# Altium footprint library Propia.PcbLib: 378 footprints (part 23 of 24)
Each footprint in its own frame and in the unit in brackets; x right, y up, seen from the top. Pads: shape width x height; smd on the part's side, far side on the other; paste and mask are expansions set on the pad; w line width, h text height; cw(c..) or ccw(c..) is an arc to the next point about the centre after c.
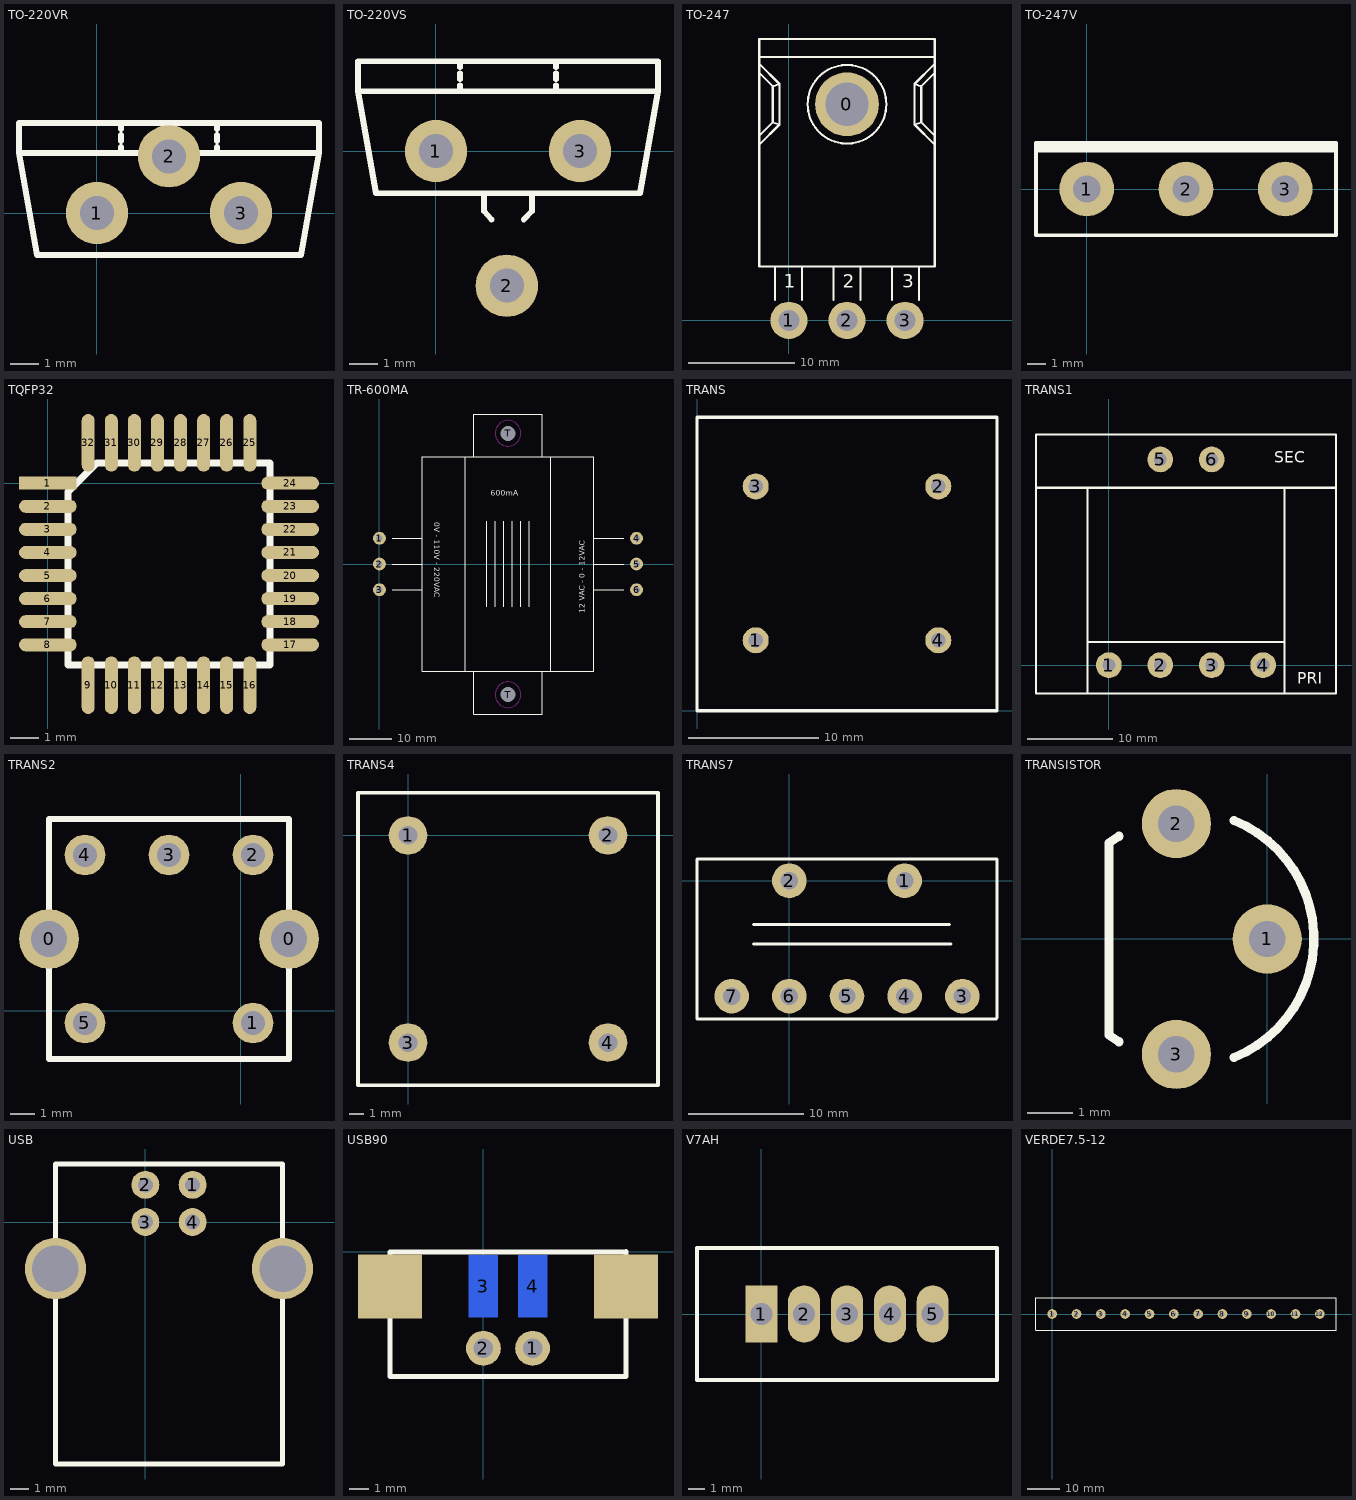
[diagram p22: the footprints below, top view; thin cyan lines are the x and y axes]

## TO-220VR [mm]
pads (3):
  round 2.2 hole 1.2: 1(0,0) 2(2.54,2) 3(5.08,0)
TopOverlay:
  lines w0.2: 0.847,2.117 0.847,2.328 ; 0.847,2.54 0.847,2.752 ; 0.847,2.963 0.847,3.175 ; 4.233,2.117 4.233,2.328 ; 4.233,2.54 4.233,2.752 ; 4.233,2.963 4.233,3.175 ; -2.752,2.117 7.832,2.117 ; -2.752,2.117 -2.117,-1.482 7.197,-1.482 7.832,2.117 ; -2.752,2.117 -2.752,3.175 7.832,3.175 7.832,2.117

## TO-220VS [mm]
pads (3):
  round 2.2 hole 1.2: 1(0,0) 2(2.5,-4.75) 3(5.08,0)
TopOverlay:
  lines w0.2: 0.847,2.117 0.847,2.328 ; 0.847,2.54 0.847,2.752 ; 0.847,2.963 0.847,3.175 ; 1.693,-1.482 1.693,-2.117 1.957,-2.416 ; 3.099,-2.416 3.387,-2.117 3.387,-1.482 ; 4.233,2.117 4.233,2.328 ; 4.233,2.54 4.233,2.752 ; 4.233,2.963 4.233,3.175 ; -2.752,2.117 -2.752,3.175 7.832,3.175 7.832,2.117 ; -2.752,2.117 -2.117,-1.482 7.197,-1.482 7.832,2.117 ; -2.752,2.117 7.832,2.117

## TO-247 [mm]
pads (4):
  round 6 hole 4.064: 0(5.461,20.32)
  round 3.5 hole 2: 1(0,0) 2(5.461,0) 3(10.922,0)
TopOverlay:
  circle w0.2: c5.461,20.32 r3.698
  lines w0.2: -2.794,16.51 -0.889,18.415 ; -2.794,17.357 -1.524,18.627 ; -2.794,23.283 -1.524,22.013 ; -2.794,24.13 -0.889,22.225 ; -2.794,24.765 13.716,24.765 ; -1.312,1.905 -1.312,5.08 ; 1.228,1.905 1.228,5.08 ; 4.191,1.905 4.191,5.08 ; 6.731,1.905 6.731,5.08 ; 9.694,1.905 9.694,5.08 ; 12.234,1.905 12.234,5.08 ; 13.716,16.51 11.811,18.415 ; 13.716,17.357 12.446,18.627 ; 13.716,23.283 12.446,22.013 ; 13.716,24.13 11.811,22.225 ; -1.524,18.627 -0.889,18.415 ; -1.524,18.627 -1.524,22.013 ; -1.524,22.013 -0.889,22.225 ; -0.889,18.415 -0.889,22.225 ; 11.811,18.415 12.446,18.627 ; 11.811,18.415 11.811,22.225 ; 11.811,22.225 12.446,22.013 ; 12.446,18.627 12.446,22.013 ; -2.794,5.08 -2.794,26.458 13.716,26.458 13.716,5.08 -2.794,5.08
  text "3" at 10.668,3.048 h1.27
  text "2" at 5.08,3.048 h1.27
  text "1" at -0.508,3.048 h1.27

## TO-247V [mm]
pads (3):
  round 3 hole 1.5: 1(0,0) 2(5.461,0) 3(10.922,0)
TopOverlay:
  lines w0.2: -2.794,2.117 13.716,2.117 ; -2.794,2.201 13.716,2.201 ; -2.794,2.328 13.716,2.328 ; -2.794,2.413 13.716,2.413 ; -2.794,-2.54 -2.794,2.54 13.716,2.54 13.716,-2.54 -2.794,-2.54

## TQFP32 [mm]
pads (32):
  rect 2x0.45 smd: 1(0,0)
  oval 2x0.45 smd: 2(0,-0.8) 3(0,-1.6) 4(0,-2.4) 5(0,-3.2) 6(0,-4) 7(0,-4.8) 8(0,-5.6) 17(8.4,-5.6) 18(8.4,-4.8) 19(8.4,-4) 20(8.4,-3.2) 21(8.4,-2.4) 22(8.4,-1.6) 23(8.4,-0.8) 24(8.4,0)
  oval 0.45x2 smd: 9(1.4,-7) 10(2.2,-7) 11(3,-7) 12(3.8,-7) 13(4.6,-7) 14(5.4,-7) 15(6.2,-7) 16(7,-7) 25(7,1.4) 26(6.2,1.4) 27(5.4,1.4) 28(4.6,1.4) 29(3.8,1.4) 30(3,1.4) 31(2.2,1.4) 32(1.4,1.4)
TopOverlay:
  lines w0.254: 0.7,-0.3 0.7,-6.3 7.7,-6.3 7.7,0.7 1.7,0.7 0.7,-0.3 ; 0.7,-0.3 0.7,-0.3

## TR-600MA [mm]
pads (8):
  round 3 hole 1.5: 1(0,6) 2(0,0) 3(0,-6) 4(60,6) 5(60,0) 6(60,-6)
  round 3 hole 3.5: T(30,-30.5) T(30,30.5)
TopOverlay:
  lines w0.254: 3,-6 9.9,-6 ; 3,0 10,0 ; 3,6 10,6 ; 20,-25 20,25 ; 22,-25 22,-35 38,-35 38,-25 ; 22,25 22,35 38,35 38,25 ; 25,-10 25,10 ; 27,-10 27,10 ; 29,-10 29,10 ; 31,-10 31,10 ; 33,-10 33,10 ; 35,-10 35,10 ; 40,-25 40,25 ; 50,-6 57,-6 ; 50,0 57,0 ; 50.1,6 57,6 ; 10,-25 10,25 50,25 50,-25 10,-25
  text "0V - 110V - 220VAC" at 12.8,9.7 h1.3
  text "12 VAC - 0 - 12VAC" at 47.9,-11.5 h1.3
  text "600mA" at 26,15.9 h1.3
KeepOutLayer:
  circle w0.254: c30,-30.5 r3
  circle w0.254: c30,30.5 r3

## TRANS [mm]
pads (4):
  round 2 hole 1.1: 1(4.5,5.4) 2(18.5,17.2) 3(4.5,17.2) 4(18.5,5.4)
TopOverlay:
  lines w0.254: 0,0 0,22.5 23,22.5 23,0 0,0

## TRANS1 [mm]
pads (6):
  round 3 hole 1.5: 1(0,0) 2(6,0) 3(12,0) 4(18,0) 5(6,24) 6(12,24)
TopOverlay:
  lines w0.254: -8.5,20.7 26.5,20.7 ; -2.5,-3.3 -2.5,20.7 ; -2.5,2.7 20.5,2.7 ; 20.5,-3.3 20.5,20.7 ; -8.5,-3.3 -8.5,26.9 26.5,26.9 26.5,-3.3 -8.5,-3.3
  text "SEC" at 19.3,23.6 h1.3
  text "PRI" at 22,-2.2 h1.3

## TRANS2 [mm]
pads (7):
  round 2.5 hole 1.5: 0(-8,3) 0(2,3)
  round 1.7 hole 1: 1(0.5,-0.5) 2(0.5,6.5) 3(-3,6.5) 4(-6.5,6.5) 5(-6.5,-0.5)
TopOverlay:
  lines w0.254: -8,-2 -8,8 2,8 2,-2 -8,-2

## TRANS4 [mm]
pads (4):
  round 2.7 hole 1.3: 1(0,0) 2(14,0) 3(0,-14.5) 4(14,-14.5)
TopOverlay:
  lines w0.254: -3.5,-17.5 17.5,-17.5 17.5,3 -3.5,3 -3.5,-17.5

## TRANS7 [mm]
pads (7):
  round 3 hole 1.5: 1(10,0) 2(0,0) 3(15,-10) 4(10,-10) 5(5,-10) 6(0,-10) 7(-5,-10)
TopOverlay:
  lines w0.254: -8,1.8 -7.9,1.9 18,1.9 18,-11.9 17.9,-12 -8,-12 -8,1.9 ; -3.1,-5.5 14,-5.5 ; -3.1,-3.8 13.9,-3.8

## TRANSISTOR [mil]
pads (3):
  round 60 hole 31.5: 1(0,0) 2(-78.74,100) 3(-78.74,-100)
TopOverlay:
  lines w7.87: -128.45,-89.08 -137.07,-83.33 -137.07,83.33 -128.45,89.08 ; -28.89,-102.76 ccw(c-70.41,0) -28.89,102.76

## USB [mm]
pads (6):
  round 1.5 hole 0.8: 1(2.54,2) 2(0,2) 3(0,0) 4(2.54,0)
  round 3.3 hole 2.5: ""(-4.83,-2.5) ""(7.37,-2.5)
TopOverlay:
  lines w0.254: 7.37,-0.04 7.37,3.12 -4.83,3.12 -4.83,-13 7.37,-13 7.37,0

## USB90 [mm]
pads (6):
  round 1.8 hole 1: 1(2.54,-5) 2(0,-5)
  rect 1.5x3.2 smd far side: 3(0,-1.8) 4(2.54,-1.8)
  rect 3.3x3.3 smd: ""(-4.83,-1.8) ""(7.37,-1.8)
TopOverlay:
  lines w0.254: 7.37,-0.04 7.37,-0.02 -4.83,-0.02 -4.83,-6.45 7.37,-6.45 7.37,0

## V7AH [mm]
pads (5):
  rect 1.9x3.4 hole 1.3: 1(0,0)
  oval 1.9x3.4 hole 1.3: 2(2.54,0) 3(5.08,0) 4(7.62,0) 5(10.16,0)
TopOverlay:
  lines w0.254: -3.81,-3.91 -3.81,3.91 13.97,3.91 13.97,-3.91 -3.81,-3.91

## VERDE7.5-12 [mm]
pads (12):
  round 3 hole 1.3: 1(0,0) 2(7.5,0) 3(15,0) 4(22.5,0) 5(30,0) 6(37.5,0) 7(45,0) 8(52.5,0) 9(60,0) 10(67.5,0) 11(75,0) 12(82.5,0)
TopOverlay:
  lines w0.254: -5,-5 87.5,-5 87.5,5 -5,5 -5,0 -5,-5